# Altium footprint library PcbLib.PcbLib: 31 footprints (part 1 of 2)
Each footprint in its own frame and in the unit in brackets; x right, y up, seen from the top. Pads: shape width x height; smd on the part's side, far side on the other; paste and mask are expansions set on the pad; w line width, h text height; cw(c..) or ccw(c..) is an arc to the next point about the centre after c.
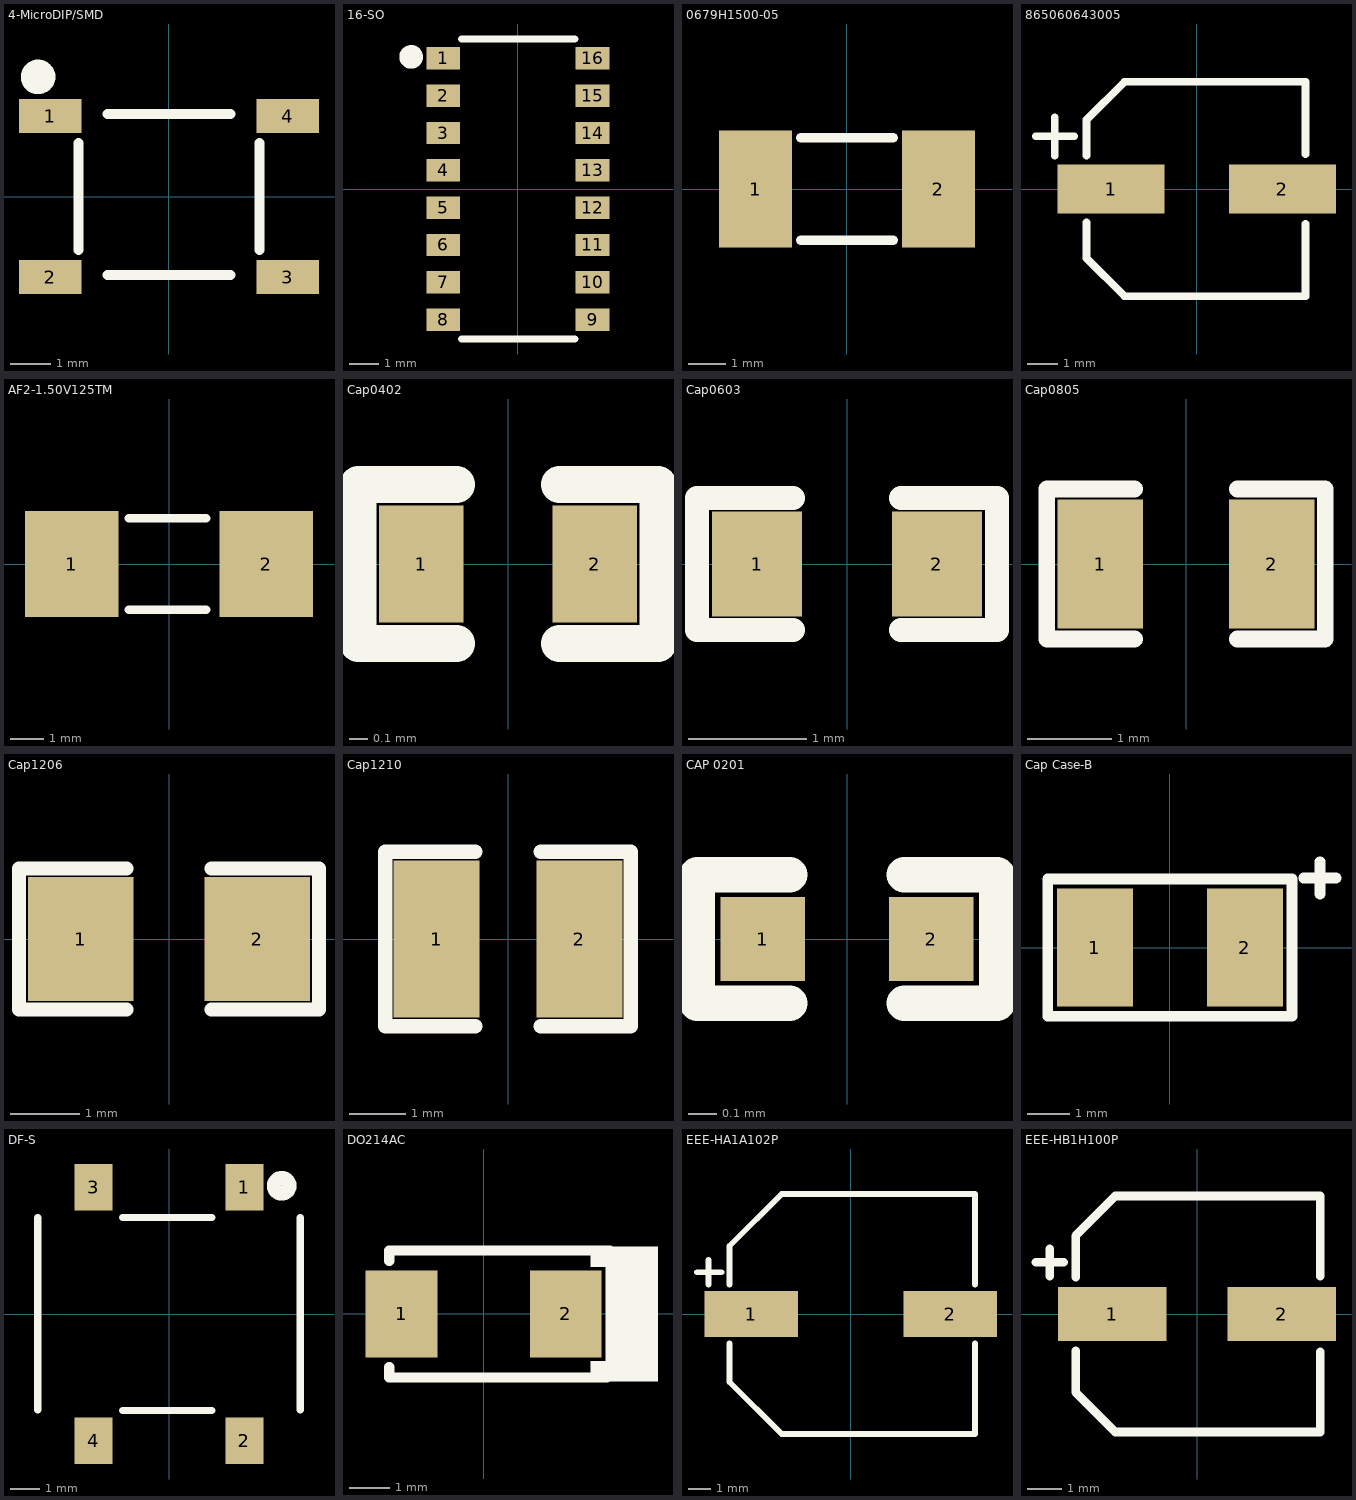
[diagram p0: the footprints below, top view; thin cyan lines are the x and y axes]

## 4-MicroDIP/SMD [mm]
pads (4):
  rect 1.55x0.85 smd: 1(-2.95,2) 2(-2.95,-2) 3(2.95,-2) 4(2.95,2)
Top Overlay:
  circle w0.5: c-3.251,2.972 r0.18
  lines w0.254: -2.25,-1.324 -2.25,0 -2.25,1.324 ; -1.524,-1.95 0,-1.95 1.524,-1.95 ; -1.524,2.05 0,2.05 1.524,2.05 ; 2.25,-1.324 2.25,0 2.25,1.324
3D body "MDB6S.STEP": height 1.4, standoff 0, extent -3.25,-2.5 3.25,2.5

## 16-SO [mil]
pads (16):
  rect 45x30 smd: 1(-100,175) 2(-100,125) 3(-100,75) 4(-100,25) 5(-100,-25) 6(-100,-75) 7(-100,-125) 8(-100,-175) 9(100,-175) 10(100,-125) 11(100,-75) 12(100,-25) 13(100,25) 14(100,75) 15(100,125) 16(100,175)
Top Overlay:
  circle w19.68: c-143,177 r6
  lines w10: -75,-201 76,-201 ; -75,201 76,201
3D body "CircuitWorks-SO-16.step": height 57, standoff 0, extent -116,-196.5 116.49,196.5

## 0679H1500-05 [mm]
pads (2):
  rect 1.96x3.15 smd: 1(-2.455,0) 2(2.455,0)
Top Overlay:
  lines w0.254: -1.245,-1.372 1.245,-1.372 ; -1.245,1.372 1.245,1.372
3D body "0679H9150-xx.stp": height 2.5, standoff -0.04, extent -3.05,-1.27 3.05,1.27

## 865060643005 [mm]
pads (2):
  rect 3.5x1.6 smd: 1(-2.8,0) 2(2.8,0)
Top Overlay:
  lines w0.254: -5.258,1.727 -4.013,1.727 ; -4.648,1.092 -4.648,2.337 ; -3.607,-2.108 -3.607,-1.092 ; -3.607,-1.854 -3.607,-2.261 -2.362,-3.505 3.556,-3.505 3.556,-1.143 ; -3.607,1.092 -3.607,2.108 ; -3.607,1.854 -3.607,2.261 -2.362,3.505 3.556,3.505 3.556,1.143
3D body "User Library-CAP_EEE_D8.step": height 8.05, standoff 0, extent -3.899,-3.403 3.899,3.404

## AF2-1.50V125TM [mm]
pads (2):
  rect 2.8x3.15 smd: 1(-2.9,0) 2(2.9,0)
Top Overlay:
  lines w0.254: -1.194,-1.372 1.118,-1.372 ; -1.194,1.372 1.118,1.372
3D body "User Library-2410 fuse.step": height 2.13, standoff -0.03, extent -3.09,-1.25 3.09,1.25

## Cap0402 [mil]
pads (2):
  rect 18x25 smd mask+2.36: 1(-18.5,0) 2(18.5,0)
Top Overlay:
  lines w7.87: -11,-17 -32,-17 -32,17 -11,17 ; 11,-17 32,-17 32,17 11,17
3D body "User Library-Capacitor 0402.step": height 18.5, standoff -1.18, extent -19.68,-9.84 19.7,9.85

## Cap0603 [mil]
pads (2):
  rect 30x35 smd mask+2.36: 1(-30,0) 2(30,0)
Top Overlay:
  lines w7.87: -18,-22 -50,-22 -50,22 -18,22 ; 18,-22 50,-22 50,22 18,22
3D body "User Library-CAPC1608X09.step": height 34.25, standoff -1.18, extent -31.51,-15.75 31.49,15.74

## Cap0805 [mil] "SMD 0805"
pads (2):
  rect 40x60 smd mask+2.76: 1(-40,0) 2(40,0)
Top Overlay:
  lines w7.87: -24,-35 -65,-35 -65,35 -24,35 ; 24,-35 65,-35 65,35 24,35
3D body "User Library-0805 SMD Capacitor.step": height 30, standoff -0.79, extent -39.36,-24.6 39.38,24.61

## Cap1206 [mil] "SMD 1206"
pads (2):
  rect 60x70 smd: 1(-50,0) 2(50,0)
Top Overlay:
  lines w7.87: -24,-40 -85,-40 -85,40 -24,40 ; 24,-40 85,-40 85,40 24,40
3D body "User Library-1206 SMD Capacitor.step": height 39.45, standoff 0, extent -62.96,-31.46 63.03,31.53

## Cap1210 [mil] "SMD 1210"
pads (2):
  rect 60x110 smd: 1(-50,0) 2(50,0)
Top Overlay:
  lines w10: -23,-61 -86,-61 -86,61 -23,61 ; 23,-61 86,-61 86,61 23,61
3D body "User Library-CAPC3225X10.step": height 39.37, standoff 0, extent -62.99,-49.21 63,49.22

## CAP 0201 [mm]
pads (2):
  rect 0.3x0.3 smd: 1(-0.3,0) 2(0.3,0)
Top Overlay:
  lines w0.127: -0.203,-0.229 -0.533,-0.229 -0.533,0.229 -0.203,0.229 ; 0.203,-0.229 0.533,-0.229 0.533,0.229 0.203,0.229
3D body "User Library-SMD Ceramic Capacitors_0201 (0603)_AB.STEP": height 0.28, standoff -0.02, extent -0.3,-0.15 0.301,0.15

## Cap Case-B [mil] "Case-B"
pads (2):
  rect 70.87x110 smd: 1(-70,0) 2(70,0)
Top Overlay:
  lines w10: 125,65 155,65 ; 140,50 140,80 ; -114,-64 -114,64 114,64 114,-64 -114,-64
3D body "User Library-AVX_BCASE.step": height 76.93, standoff -2.99, extent -72.84,-57.68 72.83,57.68

## DF-S [mm]
pads (4):
  rect 1.3x1.6 smd: 1(2.6,4.37) 2(2.6,-4.37) 3(-2.6,4.37) 4(-2.6,-4.37)
Top Overlay:
  circle w0.5: c3.886,4.42 r0.262
  lines w0.254: -4.521,-3.302 -4.521,3.327 ; -1.6,-3.327 1.473,-3.327 ; -1.6,3.327 1.473,3.327 ; 4.521,-3.302 4.521,3.327
3D body "User Library-Bridge rectifier DFS package-1.step": height 3.02, standoff 0, extent -4.4,-4.985 4.4,4.985

## DO214AC [mil]
pads (2):
  rect 70x85 smd: 1(-80,0) 2(80,0)
Top Overlay:
  rectangle: 104,-62 122,-46
  rectangle: 104,46 122,62
  rectangle: 119,-66 170,66
  lines w10: -92,-52 -92,-62 120,-62 ; -92,52 -92,62 104,62 123,62
3D body "User Library-S1G-1.step": height 106.3, standoff 0, extent -110.24,-58.08 110.23,58.06

## EEE-HA1A102P [mm]
pads (2):
  rect 4.1x2 smd: 1(-4.35,0) 2(4.35,0)
Top Overlay:
  lines w0.254: -6.731,1.829 -5.664,1.829 ; -6.223,1.295 -6.223,2.362 ; -5.309,-1.295 -5.309,-2.972 -3.023,-5.258 5.436,-5.258 5.436,-1.295 ; -5.309,1.295 -5.309,2.972 -3.023,5.258 5.436,5.258 5.436,1.295
3D body "猞10 SIZE CODE G.stp": height 10.2, standoff 0, extent -5.85,-5.15 5.85,5.15

## EEE-HB1H100P [mm]
pads (2):
  rect 3.2x1.6 smd: 1(-2.5,0) 2(2.5,0)
Top Overlay:
  lines w0.254: -4.75,1.524 -3.937,1.524 ; -4.343,1.118 -4.343,1.93 ; -3.581,-1.092 -3.581,-1.981 -3.581,-2.311 -2.413,-3.48 3.632,-3.48 3.632,-1.118 ; -3.581,1.092 -3.581,1.981 -3.581,2.311 -2.413,3.48 3.632,3.48 3.632,1.118
3D body "CAP_EEEHB_D_PAN.step": height 6.15, standoff 0, extent -3.899,-3.404 3.899,3.404